# Altium footprint library MY_LIB_Connectors.PcbLib: 358 footprints (part 6 of 23)
Each footprint in its own frame and in the unit in brackets; x right, y up, seen from the top. Pads: shape width x height; smd on the part's side, far side on the other; paste and mask are expansions set on the pad; w line width, h text height; cw(c..) or ccw(c..) is an arc to the next point about the centre after c.
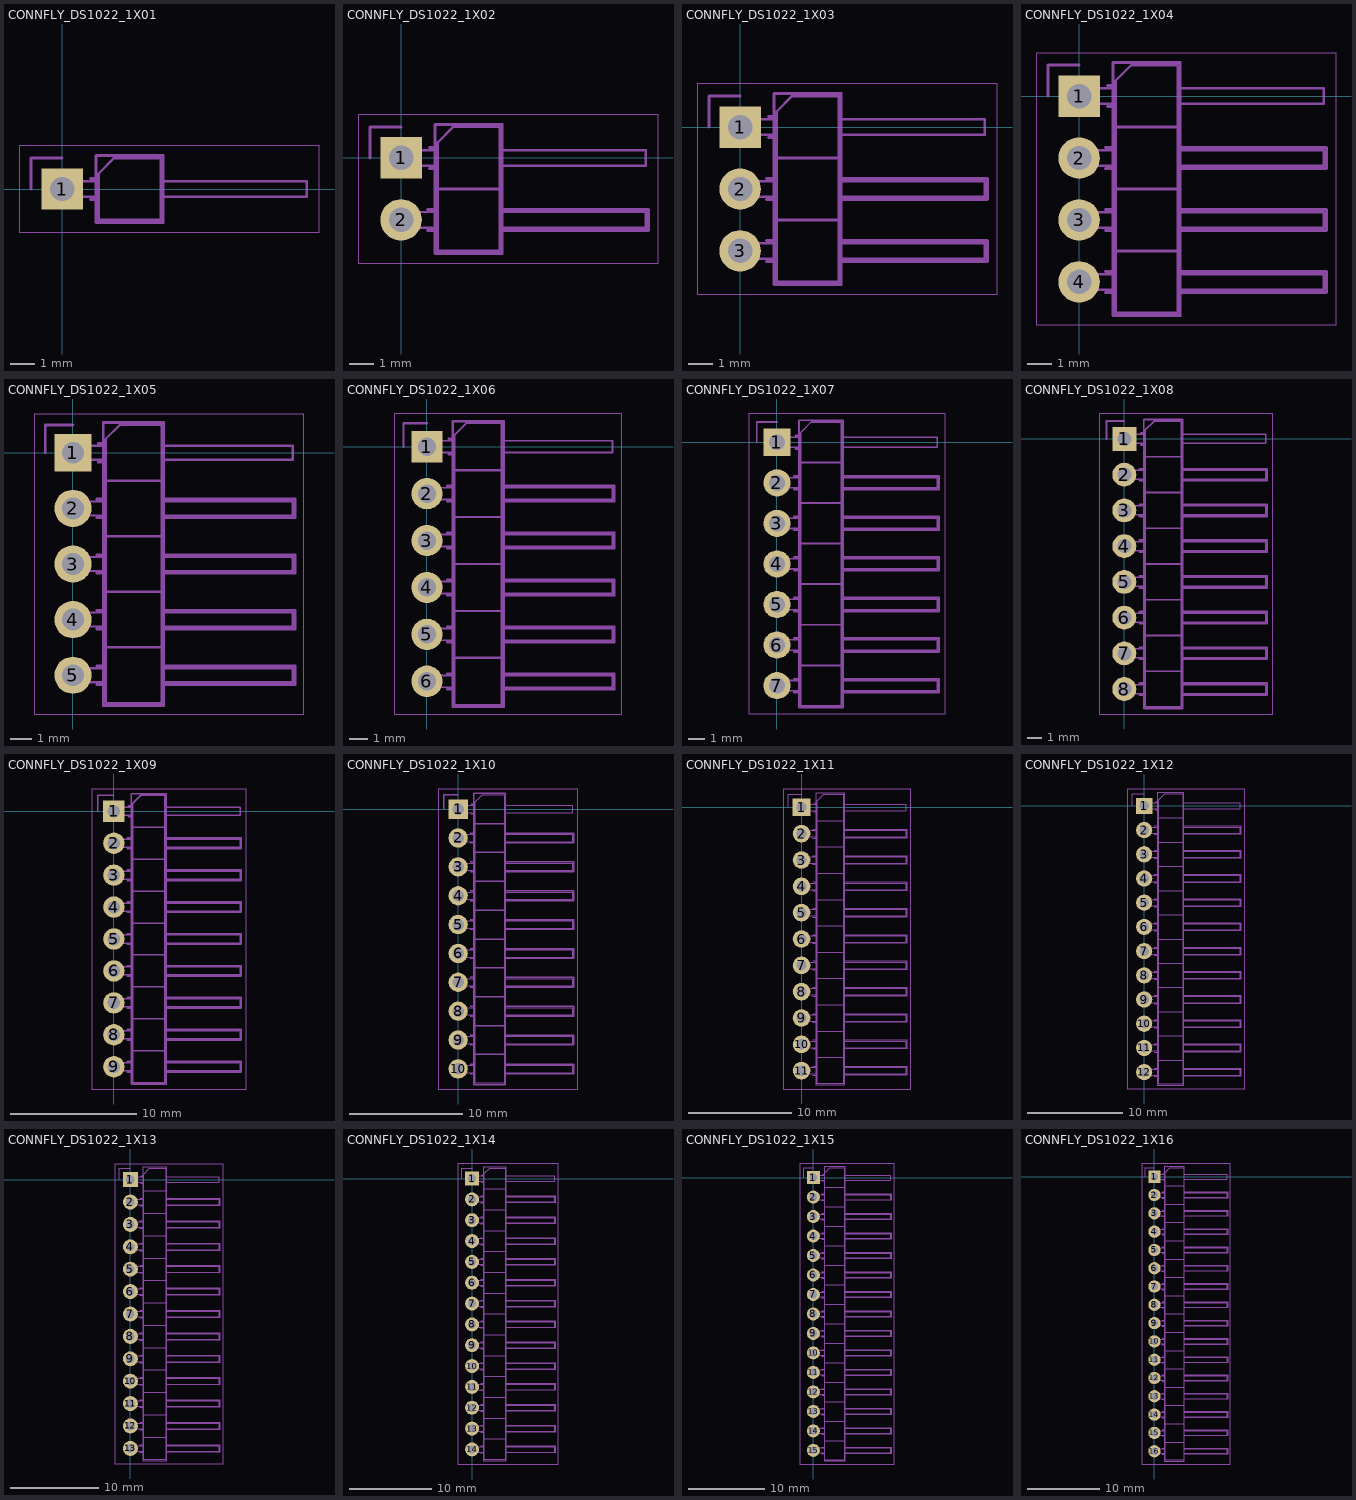
[diagram p5: the footprints below, top view; thin cyan lines are the x and y axes]

## CONNFLY_DS1022_1X01 [mm] "Connfly DS1022 1x1 standard KiCad; PTH1.0 pad1.7 pitch2.54; CC-BY-SA-4.0; STEP generic"
height 2.54
pads (1):
  rect 1.7x1.7 hole 1 paste-2539.97 mask+0.05: 1(0,0)
Mechanical 15:
  lines w0.05: -1.77,-1.77 -1.77,1.77 10.54,1.77 10.54,-1.77 -1.77,-1.77
  lines w0.1: 1.5,-0.32 -0.32,-0.32 -0.32,0.32 1.5,0.32 ; 4.04,-0.32 10.04,-0.32 10.04,0.32 4.04,0.32 ; 1.5,-1.27 1.5,0.635 2.135,1.27 4.04,1.27 4.04,-1.27 1.5,-1.27
  lines w0.12: -1.27,0 -1.27,1.27 0,1.27 ; 1.16,-0.43 1.39,-0.43 ; 1.16,0.43 1.39,0.43 ; 1.39,-1.38 1.39,1.38 4.15,1.38 4.15,-1.38 1.39,-1.38
3D body "PinHeader_1x01_P2.54mm_Horizontal.step": height 2.54, standoff -3, extent -0.32,-1.27 10.04,1.27

## CONNFLY_DS1022_1X02 [mm] "Connfly DS1022 1x2 standard KiCad; PTH1.0 pad1.7 pitch2.54; CC-BY-SA-4.0; STEP generic"
height 2.54
pads (2):
  rect 1.7x1.7 hole 1 paste-2539.97 mask+0.05: 1(0,0)
  round 1.7 hole 1 paste-2539.97 mask+0.05: 2(0,-2.54)
Mechanical 15:
  lines w0.05: -1.77,-4.32 -1.77,1.77 10.54,1.77 10.54,-4.32 -1.77,-4.32
  lines w0.1: 1.5,-2.86 -0.32,-2.86 -0.32,-2.22 1.5,-2.22 ; 1.5,-0.32 -0.32,-0.32 -0.32,0.32 1.5,0.32 ; 4.04,-2.86 10.04,-2.86 10.04,-2.22 4.04,-2.22 ; 4.04,-0.32 10.04,-0.32 10.04,0.32 4.04,0.32 ; 1.5,-3.81 1.5,0.635 2.135,1.27 4.04,1.27 4.04,-3.81 1.5,-3.81
  lines w0.12: -1.27,0 -1.27,1.27 0,1.27 ; 1.077,-2.97 1.39,-2.97 ; 1.077,-2.11 1.39,-2.11 ; 1.16,-0.43 1.39,-0.43 ; 1.16,0.43 1.39,0.43 ; 1.39,-1.27 4.15,-1.27 ; 4.15,-2.97 10.15,-2.97 10.15,-2.11 4.15,-2.11 ; 1.39,-3.92 1.39,1.38 4.15,1.38 4.15,-3.92 1.39,-3.92
3D body "PinHeader_1x02_P2.54mm_Horizontal.step": height 2.54, standoff -3, extent -0.32,-3.81 10.04,1.27

## CONNFLY_DS1022_1X03 [mm] "Connfly DS1022 1x3 standard KiCad; PTH1.0 pad1.7 pitch2.54; CC-BY-SA-4.0; STEP generic"
height 2.54
pads (3):
  rect 1.7x1.7 hole 1 paste-2539.97 mask+0.05: 1(0,0)
  round 1.7 hole 1 paste-2539.97 mask+0.05: 2(0,-2.54) 3(0,-5.08)
Mechanical 15:
  lines w0.05: -1.77,-6.85 -1.77,1.77 10.54,1.77 10.54,-6.85 -1.77,-6.85
  lines w0.1: 1.5,-5.4 -0.32,-5.4 -0.32,-4.76 1.5,-4.76 ; 1.5,-2.86 -0.32,-2.86 -0.32,-2.22 1.5,-2.22 ; 1.5,-0.32 -0.32,-0.32 -0.32,0.32 1.5,0.32 ; 4.04,-5.4 10.04,-5.4 10.04,-4.76 4.04,-4.76 ; 4.04,-2.86 10.04,-2.86 10.04,-2.22 4.04,-2.22 ; 4.04,-0.32 10.04,-0.32 10.04,0.32 4.04,0.32 ; 1.5,-6.35 1.5,0.635 2.135,1.27 4.04,1.27 4.04,-6.35 1.5,-6.35
  lines w0.12: -1.27,0 -1.27,1.27 0,1.27 ; 1.077,-5.51 1.39,-5.51 ; 1.077,-4.65 1.39,-4.65 ; 1.077,-2.97 1.39,-2.97 ; 1.077,-2.11 1.39,-2.11 ; 1.16,-0.43 1.39,-0.43 ; 1.16,0.43 1.39,0.43 ; 1.39,-3.81 4.15,-3.81 ; 1.39,-1.27 4.15,-1.27 ; 4.15,-5.51 10.15,-5.51 10.15,-4.65 4.15,-4.65 ; 4.15,-2.97 10.15,-2.97 10.15,-2.11 4.15,-2.11 ; 1.39,-6.46 1.39,1.38 4.15,1.38 4.15,-6.46 1.39,-6.46
3D body "PinHeader_1x03_P2.54mm_Horizontal.step": height 2.54, standoff -3, extent -0.32,-6.35 10.04,1.27

## CONNFLY_DS1022_1X04 [mm] "Connfly DS1022 1x4 standard KiCad; PTH1.0 pad1.7 pitch2.54; CC-BY-SA-4.0; STEP generic"
height 2.54
pads (4):
  rect 1.7x1.7 hole 1 paste-2539.97 mask+0.05: 1(0,0)
  round 1.7 hole 1 paste-2539.97 mask+0.05: 2(0,-2.54) 3(0,-5.08) 4(0,-7.62)
Mechanical 15:
  lines w0.05: -1.77,-9.39 -1.77,1.77 10.54,1.77 10.54,-9.39 -1.77,-9.39
  lines w0.1: 1.5,-7.94 -0.32,-7.94 -0.32,-7.3 1.5,-7.3 ; 1.5,-5.4 -0.32,-5.4 -0.32,-4.76 1.5,-4.76 ; 1.5,-2.86 -0.32,-2.86 -0.32,-2.22 1.5,-2.22 ; 1.5,-0.32 -0.32,-0.32 -0.32,0.32 1.5,0.32 ; 4.04,-7.94 10.04,-7.94 10.04,-7.3 4.04,-7.3 ; 4.04,-5.4 10.04,-5.4 10.04,-4.76 4.04,-4.76 ; 4.04,-2.86 10.04,-2.86 10.04,-2.22 4.04,-2.22 ; 4.04,-0.32 10.04,-0.32 10.04,0.32 4.04,0.32 ; 1.5,-8.89 1.5,0.635 2.135,1.27 4.04,1.27 4.04,-8.89 1.5,-8.89
  lines w0.12: -1.27,0 -1.27,1.27 0,1.27 ; 1.077,-8.05 1.39,-8.05 ; 1.077,-7.19 1.39,-7.19 ; 1.077,-5.51 1.39,-5.51 ; 1.077,-4.65 1.39,-4.65 ; 1.077,-2.97 1.39,-2.97 ; 1.077,-2.11 1.39,-2.11 ; 1.16,-0.43 1.39,-0.43 ; 1.16,0.43 1.39,0.43 ; 1.39,-6.35 4.15,-6.35 ; 1.39,-3.81 4.15,-3.81 ; 1.39,-1.27 4.15,-1.27 ; 4.15,-8.05 10.15,-8.05 10.15,-7.19 4.15,-7.19 ; 4.15,-5.51 10.15,-5.51 10.15,-4.65 4.15,-4.65 ; 4.15,-2.97 10.15,-2.97 10.15,-2.11 4.15,-2.11 ; 1.39,-9 1.39,1.38 4.15,1.38 4.15,-9 1.39,-9
3D body "PinHeader_1x04_P2.54mm_Horizontal.step": height 2.54, standoff -3, extent -0.32,-8.89 10.04,1.27

## CONNFLY_DS1022_1X05 [mm] "Connfly DS1022 1x5 standard KiCad; PTH1.0 pad1.7 pitch2.54; CC-BY-SA-4.0; STEP generic"
height 2.54
pads (5):
  rect 1.7x1.7 hole 1 paste-2539.97 mask+0.05: 1(0,0)
  round 1.7 hole 1 paste-2539.97 mask+0.05: 2(0,-2.54) 3(0,-5.08) 4(0,-7.62) 5(0,-10.16)
Mechanical 15:
  lines w0.05: -1.77,-11.93 -1.77,1.77 10.54,1.77 10.54,-11.93 -1.77,-11.93
  lines w0.1: 1.5,-10.48 -0.32,-10.48 -0.32,-9.84 1.5,-9.84 ; 1.5,-7.94 -0.32,-7.94 -0.32,-7.3 1.5,-7.3 ; 1.5,-5.4 -0.32,-5.4 -0.32,-4.76 1.5,-4.76 ; 1.5,-2.86 -0.32,-2.86 -0.32,-2.22 1.5,-2.22 ; 1.5,-0.32 -0.32,-0.32 -0.32,0.32 1.5,0.32 ; 4.04,-10.48 10.04,-10.48 10.04,-9.84 4.04,-9.84 ; 4.04,-7.94 10.04,-7.94 10.04,-7.3 4.04,-7.3 ; 4.04,-5.4 10.04,-5.4 10.04,-4.76 4.04,-4.76 ; 4.04,-2.86 10.04,-2.86 10.04,-2.22 4.04,-2.22 ; 4.04,-0.32 10.04,-0.32 10.04,0.32 4.04,0.32 ; 1.5,-11.43 1.5,0.635 2.135,1.27 4.04,1.27 4.04,-11.43 1.5,-11.43
  lines w0.12: -1.27,0 -1.27,1.27 0,1.27 ; 1.077,-10.59 1.39,-10.59 ; 1.077,-9.73 1.39,-9.73 ; 1.077,-8.05 1.39,-8.05 ; 1.077,-7.19 1.39,-7.19 ; 1.077,-5.51 1.39,-5.51 ; 1.077,-4.65 1.39,-4.65 ; 1.077,-2.97 1.39,-2.97 ; 1.077,-2.11 1.39,-2.11 ; 1.16,-0.43 1.39,-0.43 ; 1.16,0.43 1.39,0.43 ; 1.39,-8.89 4.15,-8.89 ; 1.39,-6.35 4.15,-6.35 ; 1.39,-3.81 4.15,-3.81 ; 1.39,-1.27 4.15,-1.27 ; 4.15,-10.59 10.15,-10.59 10.15,-9.73 4.15,-9.73 ; 4.15,-8.05 10.15,-8.05 10.15,-7.19 4.15,-7.19 ; 4.15,-5.51 10.15,-5.51 10.15,-4.65 4.15,-4.65 ; 4.15,-2.97 10.15,-2.97 10.15,-2.11 4.15,-2.11 ; 1.39,-11.54 1.39,1.38 4.15,1.38 4.15,-11.54 1.39,-11.54
3D body "PinHeader_1x05_P2.54mm_Horizontal.step": height 2.54, standoff -3, extent -0.32,-11.43 10.04,1.27

## CONNFLY_DS1022_1X06 [mm] "Connfly DS1022 1x6 standard KiCad; PTH1.0 pad1.7 pitch2.54; CC-BY-SA-4.0; STEP generic"
height 2.54
pads (6):
  rect 1.7x1.7 hole 1 paste-2539.97 mask+0.05: 1(0,0)
  round 1.7 hole 1 paste-2539.97 mask+0.05: 2(0,-2.54) 3(0,-5.08) 4(0,-7.62) 5(0,-10.16) 6(0,-12.7)
Mechanical 15:
  lines w0.05: -1.77,-14.47 -1.77,1.77 10.54,1.77 10.54,-14.47 -1.77,-14.47
  lines w0.1: 1.5,-13.02 -0.32,-13.02 -0.32,-12.38 1.5,-12.38 ; 1.5,-10.48 -0.32,-10.48 -0.32,-9.84 1.5,-9.84 ; 1.5,-7.94 -0.32,-7.94 -0.32,-7.3 1.5,-7.3 ; 1.5,-5.4 -0.32,-5.4 -0.32,-4.76 1.5,-4.76 ; 1.5,-2.86 -0.32,-2.86 -0.32,-2.22 1.5,-2.22 ; 1.5,-0.32 -0.32,-0.32 -0.32,0.32 1.5,0.32 ; 4.04,-13.02 10.04,-13.02 10.04,-12.38 4.04,-12.38 ; 4.04,-10.48 10.04,-10.48 10.04,-9.84 4.04,-9.84 ; 4.04,-7.94 10.04,-7.94 10.04,-7.3 4.04,-7.3 ; 4.04,-5.4 10.04,-5.4 10.04,-4.76 4.04,-4.76 ; 4.04,-2.86 10.04,-2.86 10.04,-2.22 4.04,-2.22 ; 4.04,-0.32 10.04,-0.32 10.04,0.32 4.04,0.32 ; 1.5,-13.97 1.5,0.635 2.135,1.27 4.04,1.27 4.04,-13.97 1.5,-13.97
  lines w0.12: -1.27,0 -1.27,1.27 0,1.27 ; 1.077,-13.13 1.39,-13.13 ; 1.077,-12.27 1.39,-12.27 ; 1.077,-10.59 1.39,-10.59 ; 1.077,-9.73 1.39,-9.73 ; 1.077,-8.05 1.39,-8.05 ; 1.077,-7.19 1.39,-7.19 ; 1.077,-5.51 1.39,-5.51 ; 1.077,-4.65 1.39,-4.65 ; 1.077,-2.97 1.39,-2.97 ; 1.077,-2.11 1.39,-2.11 ; 1.16,-0.43 1.39,-0.43 ; 1.16,0.43 1.39,0.43 ; 1.39,-11.43 4.15,-11.43 ; 1.39,-8.89 4.15,-8.89 ; 1.39,-6.35 4.15,-6.35 ; 1.39,-3.81 4.15,-3.81 ; 1.39,-1.27 4.15,-1.27 ; 4.15,-13.13 10.15,-13.13 10.15,-12.27 4.15,-12.27 ; 4.15,-10.59 10.15,-10.59 10.15,-9.73 4.15,-9.73 ; 4.15,-8.05 10.15,-8.05 10.15,-7.19 4.15,-7.19 ; 4.15,-5.51 10.15,-5.51 10.15,-4.65 4.15,-4.65 ; 4.15,-2.97 10.15,-2.97 10.15,-2.11 4.15,-2.11 ; 1.39,-14.08 1.39,1.38 4.15,1.38 4.15,-14.08 1.39,-14.08
3D body "PinHeader_1x06_P2.54mm_Horizontal.step": height 2.54, standoff -3, extent -0.32,-13.97 10.04,1.27

## CONNFLY_DS1022_1X07 [mm] "Connfly DS1022 1x7 standard KiCad; PTH1.0 pad1.7 pitch2.54; CC-BY-SA-4.0; STEP generic"
height 2.54
pads (7):
  rect 1.7x1.7 hole 1 paste-2539.97 mask+0.05: 1(0,0)
  round 1.7 hole 1 paste-2539.97 mask+0.05: 2(0,-2.54) 3(0,-5.08) 4(0,-7.62) 5(0,-10.16) 6(0,-12.7) 7(0,-15.24)
Mechanical 15:
  lines w0.05: -1.77,-17.02 -1.77,1.77 10.54,1.77 10.54,-17.02 -1.77,-17.02
  lines w0.1: 1.5,-15.56 -0.32,-15.56 -0.32,-14.92 1.5,-14.92 ; 1.5,-13.02 -0.32,-13.02 -0.32,-12.38 1.5,-12.38 ; 1.5,-10.48 -0.32,-10.48 -0.32,-9.84 1.5,-9.84 ; 1.5,-7.94 -0.32,-7.94 -0.32,-7.3 1.5,-7.3 ; 1.5,-5.4 -0.32,-5.4 -0.32,-4.76 1.5,-4.76 ; 1.5,-2.86 -0.32,-2.86 -0.32,-2.22 1.5,-2.22 ; 1.5,-0.32 -0.32,-0.32 -0.32,0.32 1.5,0.32 ; 4.04,-15.56 10.04,-15.56 10.04,-14.92 4.04,-14.92 ; 4.04,-13.02 10.04,-13.02 10.04,-12.38 4.04,-12.38 ; 4.04,-10.48 10.04,-10.48 10.04,-9.84 4.04,-9.84 ; 4.04,-7.94 10.04,-7.94 10.04,-7.3 4.04,-7.3 ; 4.04,-5.4 10.04,-5.4 10.04,-4.76 4.04,-4.76 ; 4.04,-2.86 10.04,-2.86 10.04,-2.22 4.04,-2.22 ; 4.04,-0.32 10.04,-0.32 10.04,0.32 4.04,0.32 ; 1.5,-16.51 1.5,0.635 2.135,1.27 4.04,1.27 4.04,-16.51 1.5,-16.51
  lines w0.12: -1.27,0 -1.27,1.27 0,1.27 ; 1.077,-15.67 1.39,-15.67 ; 1.077,-14.81 1.39,-14.81 ; 1.077,-13.13 1.39,-13.13 ; 1.077,-12.27 1.39,-12.27 ; 1.077,-10.59 1.39,-10.59 ; 1.077,-9.73 1.39,-9.73 ; 1.077,-8.05 1.39,-8.05 ; 1.077,-7.19 1.39,-7.19 ; 1.077,-5.51 1.39,-5.51 ; 1.077,-4.65 1.39,-4.65 ; 1.077,-2.97 1.39,-2.97 ; 1.077,-2.11 1.39,-2.11 ; 1.16,-0.43 1.39,-0.43 ; 1.16,0.43 1.39,0.43 ; 1.39,-13.97 4.15,-13.97 ; 1.39,-11.43 4.15,-11.43 ; 1.39,-8.89 4.15,-8.89 ; 1.39,-6.35 4.15,-6.35 ; 1.39,-3.81 4.15,-3.81 ; 1.39,-1.27 4.15,-1.27 ; 4.15,-15.67 10.15,-15.67 10.15,-14.81 4.15,-14.81 ; 4.15,-13.13 10.15,-13.13 10.15,-12.27 4.15,-12.27 ; 4.15,-10.59 10.15,-10.59 10.15,-9.73 4.15,-9.73 ; 4.15,-8.05 10.15,-8.05 10.15,-7.19 4.15,-7.19 ; 4.15,-5.51 10.15,-5.51 10.15,-4.65 4.15,-4.65 ; 4.15,-2.97 10.15,-2.97 10.15,-2.11 4.15,-2.11 ; 1.39,-16.62 1.39,1.38 4.15,1.38 4.15,-16.62 1.39,-16.62
3D body "PinHeader_1x07_P2.54mm_Horizontal.step": height 2.54, standoff -3, extent -0.32,-16.51 10.04,1.27

## CONNFLY_DS1022_1X08 [mm] "Connfly DS1022 1x8 standard KiCad; PTH1.0 pad1.7 pitch2.54; CC-BY-SA-4.0; STEP generic"
height 2.54
pads (8):
  rect 1.7x1.7 hole 1 paste-2539.97 mask+0.05: 1(0,0)
  round 1.7 hole 1 paste-2539.97 mask+0.05: 2(0,-2.54) 3(0,-5.08) 4(0,-7.62) 5(0,-10.16) 6(0,-12.7) 7(0,-15.24) 8(0,-17.78)
Mechanical 15:
  lines w0.05: -1.77,-19.55 -1.77,1.77 10.54,1.77 10.54,-19.55 -1.77,-19.55
  lines w0.1: 1.5,-18.1 -0.32,-18.1 -0.32,-17.46 1.5,-17.46 ; 1.5,-15.56 -0.32,-15.56 -0.32,-14.92 1.5,-14.92 ; 1.5,-13.02 -0.32,-13.02 -0.32,-12.38 1.5,-12.38 ; 1.5,-10.48 -0.32,-10.48 -0.32,-9.84 1.5,-9.84 ; 1.5,-7.94 -0.32,-7.94 -0.32,-7.3 1.5,-7.3 ; 1.5,-5.4 -0.32,-5.4 -0.32,-4.76 1.5,-4.76 ; 1.5,-2.86 -0.32,-2.86 -0.32,-2.22 1.5,-2.22 ; 1.5,-0.32 -0.32,-0.32 -0.32,0.32 1.5,0.32 ; 4.04,-18.1 10.04,-18.1 10.04,-17.46 4.04,-17.46 ; 4.04,-15.56 10.04,-15.56 10.04,-14.92 4.04,-14.92 ; 4.04,-13.02 10.04,-13.02 10.04,-12.38 4.04,-12.38 ; 4.04,-10.48 10.04,-10.48 10.04,-9.84 4.04,-9.84 ; 4.04,-7.94 10.04,-7.94 10.04,-7.3 4.04,-7.3 ; 4.04,-5.4 10.04,-5.4 10.04,-4.76 4.04,-4.76 ; 4.04,-2.86 10.04,-2.86 10.04,-2.22 4.04,-2.22 ; 4.04,-0.32 10.04,-0.32 10.04,0.32 4.04,0.32 ; 1.5,-19.05 1.5,0.635 2.135,1.27 4.04,1.27 4.04,-19.05 1.5,-19.05
  lines w0.12: -1.27,0 -1.27,1.27 0,1.27 ; 1.077,-18.21 1.39,-18.21 ; 1.077,-17.35 1.39,-17.35 ; 1.077,-15.67 1.39,-15.67 ; 1.077,-14.81 1.39,-14.81 ; 1.077,-13.13 1.39,-13.13 ; 1.077,-12.27 1.39,-12.27 ; 1.077,-10.59 1.39,-10.59 ; 1.077,-9.73 1.39,-9.73 ; 1.077,-8.05 1.39,-8.05 ; 1.077,-7.19 1.39,-7.19 ; 1.077,-5.51 1.39,-5.51 ; 1.077,-4.65 1.39,-4.65 ; 1.077,-2.97 1.39,-2.97 ; 1.077,-2.11 1.39,-2.11 ; 1.16,-0.43 1.39,-0.43 ; 1.16,0.43 1.39,0.43 ; 1.39,-16.51 4.15,-16.51 ; 1.39,-13.97 4.15,-13.97 ; 1.39,-11.43 4.15,-11.43 ; 1.39,-8.89 4.15,-8.89 ; 1.39,-6.35 4.15,-6.35 ; 1.39,-3.81 4.15,-3.81 ; 1.39,-1.27 4.15,-1.27 ; 4.15,-18.21 10.15,-18.21 10.15,-17.35 4.15,-17.35 ; 4.15,-15.67 10.15,-15.67 10.15,-14.81 4.15,-14.81 ; 4.15,-13.13 10.15,-13.13 10.15,-12.27 4.15,-12.27 ; 4.15,-10.59 10.15,-10.59 10.15,-9.73 4.15,-9.73 ; 4.15,-8.05 10.15,-8.05 10.15,-7.19 4.15,-7.19 ; 4.15,-5.51 10.15,-5.51 10.15,-4.65 4.15,-4.65 ; 4.15,-2.97 10.15,-2.97 10.15,-2.11 4.15,-2.11 ; 1.39,-19.16 1.39,1.38 4.15,1.38 4.15,-19.16 1.39,-19.16
3D body "PinHeader_1x08_P2.54mm_Horizontal.step": height 2.54, standoff -3, extent -0.32,-19.05 10.04,1.27

## CONNFLY_DS1022_1X09 [mm] "Connfly DS1022 1x9 standard KiCad; PTH1.0 pad1.7 pitch2.54; CC-BY-SA-4.0; STEP generic"
height 2.54
pads (9):
  rect 1.7x1.7 hole 1 paste-2539.97 mask+0.05: 1(0,0)
  round 1.7 hole 1 paste-2539.97 mask+0.05: 2(0,-2.54) 3(0,-5.08) 4(0,-7.62) 5(0,-10.16) 6(0,-12.7) 7(0,-15.24) 8(0,-17.78) 9(0,-20.32)
Mechanical 15:
  lines w0.05: -1.77,-22.09 -1.77,1.77 10.54,1.77 10.54,-22.09 -1.77,-22.09
  lines w0.1: 1.5,-20.64 -0.32,-20.64 -0.32,-20 1.5,-20 ; 1.5,-18.1 -0.32,-18.1 -0.32,-17.46 1.5,-17.46 ; 1.5,-15.56 -0.32,-15.56 -0.32,-14.92 1.5,-14.92 ; 1.5,-13.02 -0.32,-13.02 -0.32,-12.38 1.5,-12.38 ; 1.5,-10.48 -0.32,-10.48 -0.32,-9.84 1.5,-9.84 ; 1.5,-7.94 -0.32,-7.94 -0.32,-7.3 1.5,-7.3 ; 1.5,-5.4 -0.32,-5.4 -0.32,-4.76 1.5,-4.76 ; 1.5,-2.86 -0.32,-2.86 -0.32,-2.22 1.5,-2.22 ; 1.5,-0.32 -0.32,-0.32 -0.32,0.32 1.5,0.32 ; 4.04,-20.64 10.04,-20.64 10.04,-20 4.04,-20 ; 4.04,-18.1 10.04,-18.1 10.04,-17.46 4.04,-17.46 ; 4.04,-15.56 10.04,-15.56 10.04,-14.92 4.04,-14.92 ; 4.04,-13.02 10.04,-13.02 10.04,-12.38 4.04,-12.38 ; 4.04,-10.48 10.04,-10.48 10.04,-9.84 4.04,-9.84 ; 4.04,-7.94 10.04,-7.94 10.04,-7.3 4.04,-7.3 ; 4.04,-5.4 10.04,-5.4 10.04,-4.76 4.04,-4.76 ; 4.04,-2.86 10.04,-2.86 10.04,-2.22 4.04,-2.22 ; 4.04,-0.32 10.04,-0.32 10.04,0.32 4.04,0.32 ; 1.5,-21.59 1.5,0.635 2.135,1.27 4.04,1.27 4.04,-21.59 1.5,-21.59
  lines w0.12: -1.27,0 -1.27,1.27 0,1.27 ; 1.077,-20.75 1.39,-20.75 ; 1.077,-19.89 1.39,-19.89 ; 1.077,-18.21 1.39,-18.21 ; 1.077,-17.35 1.39,-17.35 ; 1.077,-15.67 1.39,-15.67 ; 1.077,-14.81 1.39,-14.81 ; 1.077,-13.13 1.39,-13.13 ; 1.077,-12.27 1.39,-12.27 ; 1.077,-10.59 1.39,-10.59 ; 1.077,-9.73 1.39,-9.73 ; 1.077,-8.05 1.39,-8.05 ; 1.077,-7.19 1.39,-7.19 ; 1.077,-5.51 1.39,-5.51 ; 1.077,-4.65 1.39,-4.65 ; 1.077,-2.97 1.39,-2.97 ; 1.077,-2.11 1.39,-2.11 ; 1.16,-0.43 1.39,-0.43 ; 1.16,0.43 1.39,0.43 ; 1.39,-19.05 4.15,-19.05 ; 1.39,-16.51 4.15,-16.51 ; 1.39,-13.97 4.15,-13.97 ; 1.39,-11.43 4.15,-11.43 ; 1.39,-8.89 4.15,-8.89 ; 1.39,-6.35 4.15,-6.35 ; 1.39,-3.81 4.15,-3.81 ; 1.39,-1.27 4.15,-1.27 ; 4.15,-20.75 10.15,-20.75 10.15,-19.89 4.15,-19.89 ; 4.15,-18.21 10.15,-18.21 10.15,-17.35 4.15,-17.35 ; 4.15,-15.67 10.15,-15.67 10.15,-14.81 4.15,-14.81 ; 4.15,-13.13 10.15,-13.13 10.15,-12.27 4.15,-12.27 ; 4.15,-10.59 10.15,-10.59 10.15,-9.73 4.15,-9.73 ; 4.15,-8.05 10.15,-8.05 10.15,-7.19 4.15,-7.19 ; 4.15,-5.51 10.15,-5.51 10.15,-4.65 4.15,-4.65 ; 4.15,-2.97 10.15,-2.97 10.15,-2.11 4.15,-2.11 ; 1.39,-21.7 1.39,1.38 4.15,1.38 4.15,-21.7 1.39,-21.7
3D body "PinHeader_1x09_P2.54mm_Horizontal.step": height 2.54, standoff -3, extent -0.32,-21.59 10.04,1.27

## CONNFLY_DS1022_1X10 [mm] "Connfly DS1022 1x10 standard KiCad; PTH1.0 pad1.7 pitch2.54; CC-BY-SA-4.0; STEP generic"
height 2.54
pads (10):
  rect 1.7x1.7 hole 1 paste-2539.97 mask+0.05: 1(0,0)
  round 1.7 hole 1 paste-2539.97 mask+0.05: 2(0,-2.54) 3(0,-5.08) 4(0,-7.62) 5(0,-10.16) 6(0,-12.7) 7(0,-15.24) 8(0,-17.78) 9(0,-20.32) 10(0,-22.86)
Mechanical 15:
  lines w0.05: -1.77,-24.63 -1.77,1.77 10.54,1.77 10.54,-24.63 -1.77,-24.63
  lines w0.1: 1.5,-23.18 -0.32,-23.18 -0.32,-22.54 1.5,-22.54 ; 1.5,-20.64 -0.32,-20.64 -0.32,-20 1.5,-20 ; 1.5,-18.1 -0.32,-18.1 -0.32,-17.46 1.5,-17.46 ; 1.5,-15.56 -0.32,-15.56 -0.32,-14.92 1.5,-14.92 ; 1.5,-13.02 -0.32,-13.02 -0.32,-12.38 1.5,-12.38 ; 1.5,-10.48 -0.32,-10.48 -0.32,-9.84 1.5,-9.84 ; 1.5,-7.94 -0.32,-7.94 -0.32,-7.3 1.5,-7.3 ; 1.5,-5.4 -0.32,-5.4 -0.32,-4.76 1.5,-4.76 ; 1.5,-2.86 -0.32,-2.86 -0.32,-2.22 1.5,-2.22 ; 1.5,-0.32 -0.32,-0.32 -0.32,0.32 1.5,0.32 ; 4.04,-23.18 10.04,-23.18 10.04,-22.54 4.04,-22.54 ; 4.04,-20.64 10.04,-20.64 10.04,-20 4.04,-20 ; 4.04,-18.1 10.04,-18.1 10.04,-17.46 4.04,-17.46 ; 4.04,-15.56 10.04,-15.56 10.04,-14.92 4.04,-14.92 ; 4.04,-13.02 10.04,-13.02 10.04,-12.38 4.04,-12.38 ; 4.04,-10.48 10.04,-10.48 10.04,-9.84 4.04,-9.84 ; 4.04,-7.94 10.04,-7.94 10.04,-7.3 4.04,-7.3 ; 4.04,-5.4 10.04,-5.4 10.04,-4.76 4.04,-4.76 ; 4.04,-2.86 10.04,-2.86 10.04,-2.22 4.04,-2.22 ; 4.04,-0.32 10.04,-0.32 10.04,0.32 4.04,0.32 ; 1.5,-24.13 1.5,0.635 2.135,1.27 4.04,1.27 4.04,-24.13 1.5,-24.13
  lines w0.12: -1.27,0 -1.27,1.27 0,1.27 ; 1.077,-23.29 1.39,-23.29 ; 1.077,-22.43 1.39,-22.43 ; 1.077,-20.75 1.39,-20.75 ; 1.077,-19.89 1.39,-19.89 ; 1.077,-18.21 1.39,-18.21 ; 1.077,-17.35 1.39,-17.35 ; 1.077,-15.67 1.39,-15.67 ; 1.077,-14.81 1.39,-14.81 ; 1.077,-13.13 1.39,-13.13 ; 1.077,-12.27 1.39,-12.27 ; 1.077,-10.59 1.39,-10.59 ; 1.077,-9.73 1.39,-9.73 ; 1.077,-8.05 1.39,-8.05 ; 1.077,-7.19 1.39,-7.19 ; 1.077,-5.51 1.39,-5.51 ; 1.077,-4.65 1.39,-4.65 ; 1.077,-2.97 1.39,-2.97 ; 1.077,-2.11 1.39,-2.11 ; 1.16,-0.43 1.39,-0.43 ; 1.16,0.43 1.39,0.43 ; 1.39,-21.59 4.15,-21.59 ; 1.39,-19.05 4.15,-19.05 ; 1.39,-16.51 4.15,-16.51 ; 1.39,-13.97 4.15,-13.97 ; 1.39,-11.43 4.15,-11.43 ; 1.39,-8.89 4.15,-8.89 ; 1.39,-6.35 4.15,-6.35 ; 1.39,-3.81 4.15,-3.81 ; 1.39,-1.27 4.15,-1.27 ; 4.15,-23.29 10.15,-23.29 10.15,-22.43 4.15,-22.43 ; 4.15,-20.75 10.15,-20.75 10.15,-19.89 4.15,-19.89 ; 4.15,-18.21 10.15,-18.21 10.15,-17.35 4.15,-17.35 ; 4.15,-15.67 10.15,-15.67 10.15,-14.81 4.15,-14.81 ; 4.15,-13.13 10.15,-13.13 10.15,-12.27 4.15,-12.27 ; 4.15,-10.59 10.15,-10.59 10.15,-9.73 4.15,-9.73 ; 4.15,-8.05 10.15,-8.05 10.15,-7.19 4.15,-7.19 ; 4.15,-5.51 10.15,-5.51 10.15,-4.65 4.15,-4.65 ; 4.15,-2.97 10.15,-2.97 10.15,-2.11 4.15,-2.11 ; 1.39,-24.24 1.39,1.38 4.15,1.38 4.15,-24.24 1.39,-24.24
3D body "PinHeader_1x10_P2.54mm_Horizontal.step": height 2.54, standoff -3, extent -0.32,-24.13 10.04,1.27

## CONNFLY_DS1022_1X11 [mm] "Connfly DS1022 1x11 standard KiCad; PTH1.0 pad1.7 pitch2.54; CC-BY-SA-4.0; STEP generic"
height 2.54
pads (11):
  rect 1.7x1.7 hole 1 paste-2539.97 mask+0.05: 1(0,0)
  round 1.7 hole 1 paste-2539.97 mask+0.05: 2(0,-2.54) 3(0,-5.08) 4(0,-7.62) 5(0,-10.16) 6(0,-12.7) 7(0,-15.24) 8(0,-17.78) 9(0,-20.32) 10(0,-22.86) 11(0,-25.4)
Mechanical 15:
  lines w0.05: -1.77,-27.17 -1.77,1.77 10.54,1.77 10.54,-27.17 -1.77,-27.17
  lines w0.1: 1.5,-25.72 -0.32,-25.72 -0.32,-25.08 1.5,-25.08 ; 1.5,-23.18 -0.32,-23.18 -0.32,-22.54 1.5,-22.54 ; 1.5,-20.64 -0.32,-20.64 -0.32,-20 1.5,-20 ; 1.5,-18.1 -0.32,-18.1 -0.32,-17.46 1.5,-17.46 ; 1.5,-15.56 -0.32,-15.56 -0.32,-14.92 1.5,-14.92 ; 1.5,-13.02 -0.32,-13.02 -0.32,-12.38 1.5,-12.38 ; 1.5,-10.48 -0.32,-10.48 -0.32,-9.84 1.5,-9.84 ; 1.5,-7.94 -0.32,-7.94 -0.32,-7.3 1.5,-7.3 ; 1.5,-5.4 -0.32,-5.4 -0.32,-4.76 1.5,-4.76 ; 1.5,-2.86 -0.32,-2.86 -0.32,-2.22 1.5,-2.22 ; 1.5,-0.32 -0.32,-0.32 -0.32,0.32 1.5,0.32 ; 4.04,-25.72 10.04,-25.72 10.04,-25.08 4.04,-25.08 ; 4.04,-23.18 10.04,-23.18 10.04,-22.54 4.04,-22.54 ; 4.04,-20.64 10.04,-20.64 10.04,-20 4.04,-20 ; 4.04,-18.1 10.04,-18.1 10.04,-17.46 4.04,-17.46 ; 4.04,-15.56 10.04,-15.56 10.04,-14.92 4.04,-14.92 ; 4.04,-13.02 10.04,-13.02 10.04,-12.38 4.04,-12.38 ; 4.04,-10.48 10.04,-10.48 10.04,-9.84 4.04,-9.84 ; 4.04,-7.94 10.04,-7.94 10.04,-7.3 4.04,-7.3 ; 4.04,-5.4 10.04,-5.4 10.04,-4.76 4.04,-4.76 ; 4.04,-2.86 10.04,-2.86 10.04,-2.22 4.04,-2.22 ; 4.04,-0.32 10.04,-0.32 10.04,0.32 4.04,0.32 ; 1.5,-26.67 1.5,0.635 2.135,1.27 4.04,1.27 4.04,-26.67 1.5,-26.67
  lines w0.12: -1.27,0 -1.27,1.27 0,1.27 ; 1.077,-25.83 1.39,-25.83 ; 1.077,-24.97 1.39,-24.97 ; 1.077,-23.29 1.39,-23.29 ; 1.077,-22.43 1.39,-22.43 ; 1.077,-20.75 1.39,-20.75 ; 1.077,-19.89 1.39,-19.89 ; 1.077,-18.21 1.39,-18.21 ; 1.077,-17.35 1.39,-17.35 ; 1.077,-15.67 1.39,-15.67 ; 1.077,-14.81 1.39,-14.81 ; 1.077,-13.13 1.39,-13.13 ; 1.077,-12.27 1.39,-12.27 ; 1.077,-10.59 1.39,-10.59 ; 1.077,-9.73 1.39,-9.73 ; 1.077,-8.05 1.39,-8.05 ; 1.077,-7.19 1.39,-7.19 ; 1.077,-5.51 1.39,-5.51 ; 1.077,-4.65 1.39,-4.65 ; 1.077,-2.97 1.39,-2.97 ; 1.077,-2.11 1.39,-2.11 ; 1.16,-0.43 1.39,-0.43 ; 1.16,0.43 1.39,0.43 ; 1.39,-24.13 4.15,-24.13 ; 1.39,-21.59 4.15,-21.59 ; 1.39,-19.05 4.15,-19.05 ; 1.39,-16.51 4.15,-16.51 ; 1.39,-13.97 4.15,-13.97 ; 1.39,-11.43 4.15,-11.43 ; 1.39,-8.89 4.15,-8.89 ; 1.39,-6.35 4.15,-6.35 ; 1.39,-3.81 4.15,-3.81 ; 1.39,-1.27 4.15,-1.27 ; 4.15,-25.83 10.15,-25.83 10.15,-24.97 4.15,-24.97 ; 4.15,-23.29 10.15,-23.29 10.15,-22.43 4.15,-22.43 ; 4.15,-20.75 10.15,-20.75 10.15,-19.89 4.15,-19.89 ; 4.15,-18.21 10.15,-18.21 10.15,-17.35 4.15,-17.35 ; 4.15,-15.67 10.15,-15.67 10.15,-14.81 4.15,-14.81 ; 4.15,-13.13 10.15,-13.13 10.15,-12.27 4.15,-12.27 ; 4.15,-10.59 10.15,-10.59 10.15,-9.73 4.15,-9.73 ; 4.15,-8.05 10.15,-8.05 10.15,-7.19 4.15,-7.19 ; 4.15,-5.51 10.15,-5.51 10.15,-4.65 4.15,-4.65 ; 4.15,-2.97 10.15,-2.97 10.15,-2.11 4.15,-2.11 ; 1.39,-26.78 1.39,1.38 4.15,1.38 4.15,-26.78 1.39,-26.78
3D body "PinHeader_1x11_P2.54mm_Horizontal.step": height 2.54, standoff -3, extent -0.32,-26.67 10.04,1.27

## CONNFLY_DS1022_1X12 [mm] "Connfly DS1022 1x12 standard KiCad; PTH1.0 pad1.7 pitch2.54; CC-BY-SA-4.0; STEP generic"
height 2.54
pads (12):
  rect 1.7x1.7 hole 1 paste-2539.97 mask+0.05: 1(0,0)
  round 1.7 hole 1 paste-2539.97 mask+0.05: 2(0,-2.54) 3(0,-5.08) 4(0,-7.62) 5(0,-10.16) 6(0,-12.7) 7(0,-15.24) 8(0,-17.78) 9(0,-20.32) 10(0,-22.86) 11(0,-25.4) 12(0,-27.94)
Mechanical 15:
  drawing of 155 lines, arcs and shapes, not listed
3D body "PinHeader_1x12_P2.54mm_Horizontal.step": height 2.54, standoff -3, extent -0.32,-29.21 10.04,1.27

## CONNFLY_DS1022_1X13 [mm] "Connfly DS1022 1x13 standard KiCad; PTH1.0 pad1.7 pitch2.54; CC-BY-SA-4.0; STEP generic"
height 2.54
pads (13):
  rect 1.7x1.7 hole 1 paste-2539.97 mask+0.05: 1(0,0)
  round 1.7 hole 1 paste-2539.97 mask+0.05: 2(0,-2.54) 3(0,-5.08) 4(0,-7.62) 5(0,-10.16) 6(0,-12.7) 7(0,-15.24) 8(0,-17.78) 9(0,-20.32) 10(0,-22.86) 11(0,-25.4) 12(0,-27.94) 13(0,-30.48)
Mechanical 15:
  drawing of 167 lines, arcs and shapes, not listed
3D body "PinHeader_1x13_P2.54mm_Horizontal.step": height 2.54, standoff -3, extent -0.32,-31.75 10.04,1.27

## CONNFLY_DS1022_1X14 [mm] "Connfly DS1022 1x14 standard KiCad; PTH1.0 pad1.7 pitch2.54; CC-BY-SA-4.0; STEP generic"
height 2.54
pads (14):
  rect 1.7x1.7 hole 1 paste-2539.97 mask+0.05: 1(0,0)
  round 1.7 hole 1 paste-2539.97 mask+0.05: 2(0,-2.54) 3(0,-5.08) 4(0,-7.62) 5(0,-10.16) 6(0,-12.7) 7(0,-15.24) 8(0,-17.78) 9(0,-20.32) 10(0,-22.86) 11(0,-25.4) 12(0,-27.94) 13(0,-30.48) 14(0,-33.02)
Mechanical 15:
  drawing of 179 lines, arcs and shapes, not listed
3D body "PinHeader_1x14_P2.54mm_Horizontal.step": height 2.54, standoff -3, extent -0.32,-34.29 10.04,1.27

## CONNFLY_DS1022_1X15 [mm] "Connfly DS1022 1x15 standard KiCad; PTH1.0 pad1.7 pitch2.54; CC-BY-SA-4.0; STEP generic"
height 2.54
pads (15):
  rect 1.7x1.7 hole 1 paste-2539.97 mask+0.05: 1(0,0)
  round 1.7 hole 1 paste-2539.97 mask+0.05: 2(0,-2.54) 3(0,-5.08) 4(0,-7.62) 5(0,-10.16) 6(0,-12.7) 7(0,-15.24) 8(0,-17.78) 9(0,-20.32) 10(0,-22.86) 11(0,-25.4) 12(0,-27.94) 13(0,-30.48) 14(0,-33.02) 15(0,-35.56)
Mechanical 15:
  drawing of 191 lines, arcs and shapes, not listed
3D body "PinHeader_1x15_P2.54mm_Horizontal.step": height 2.54, standoff -3, extent -0.32,-36.83 10.04,1.27

## CONNFLY_DS1022_1X16 [mm] "Connfly DS1022 1x16 standard KiCad; PTH1.0 pad1.7 pitch2.54; CC-BY-SA-4.0; STEP generic"
height 2.54
pads (16):
  rect 1.7x1.7 hole 1 paste-2539.97 mask+0.05: 1(0,0)
  round 1.7 hole 1 paste-2539.97 mask+0.05: 2(0,-2.54) 3(0,-5.08) 4(0,-7.62) 5(0,-10.16) 6(0,-12.7) 7(0,-15.24) 8(0,-17.78) 9(0,-20.32) 10(0,-22.86) 11(0,-25.4) 12(0,-27.94) 13(0,-30.48) 14(0,-33.02) 15(0,-35.56) 16(0,-38.1)
Mechanical 15:
  drawing of 203 lines, arcs and shapes, not listed
3D body "PinHeader_1x16_P2.54mm_Horizontal.step": height 2.54, standoff -3, extent -0.32,-39.37 10.04,1.27